# Altium schematic symbol library MY_LIB_Inductors.SchLib: 1 symbol
Pins are listed as number, name and electrical type; pins without a type are passive.

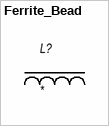
[diagram p0: symbol Ferrite_Bead]

## Ferrite_Bead
designator L?
Generic ferrite bead; manually redrawn to DBUR _Ind_ferrit geometry; black; Value: *
pins: 1, 2